# Altium footprint library FootPrintLib_10.PcbLib: 270 footprints (part 3 of 17)
Each footprint in its own frame and in the unit in brackets; x right, y up, seen from the top. Pads: shape width x height; smd on the part's side, far side on the other; paste and mask are expansions set on the pad; w line width, h text height; cw(c..) or ccw(c..) is an arc to the next point about the centre after c.
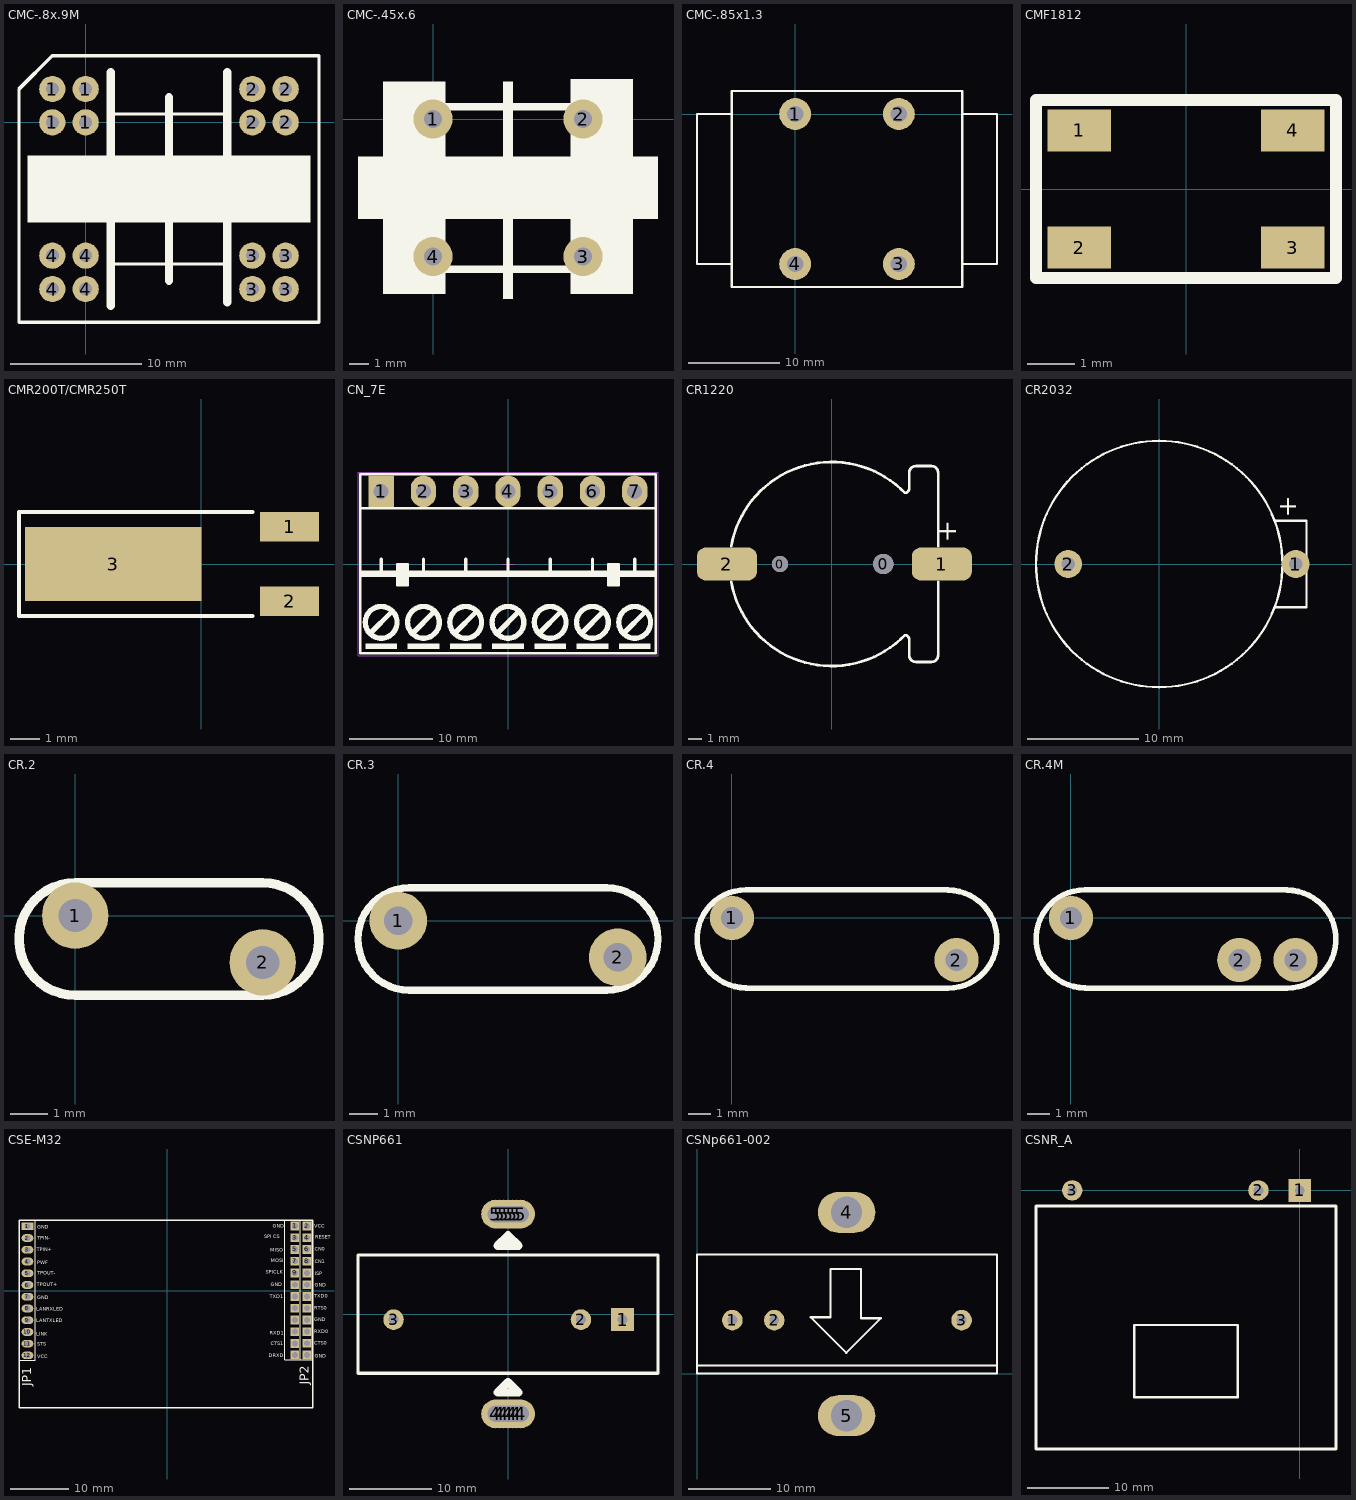
[diagram p2: the footprints below, top view; thin cyan lines are the x and y axes]

## CMC-.8x.9M [mm]
pads (16):
  round 2 hole 1: 1(-2.54,0) 1(-2.54,2.54) 1(0,0) 1(0,2.54) 2(12.7,0) 2(12.7,2.54) 2(15.24,0) 2(15.24,2.54) 3(12.7,-12.7) 3(12.7,-10.16) 3(15.24,-12.7) 3(15.24,-10.16) 4(-2.54,-12.7) 4(-2.54,-10.16) 4(0,-12.7) 4(0,-10.16)
Top Overlay:
  rectangle: -4.445,-7.62 17.145,-2.54
  lines w0.254: 1.905,-10.795 10.795,-10.795 ; 1.905,0.635 6.35,0.635 ; 6.35,1.905 6.35,0.635 ; 10.795,0.635 6.35,0.635 ; -5.08,-15.24 -5.08,2.54 -2.54,5.08 17.78,5.08 17.78,-15.24 -5.08,-15.24
  lines w0.635: 1.905,-13.97 1.905,3.81 ; 6.35,-12.065 6.35,1.905 ; 10.795,-13.716 10.795,3.81

## CMC-.45x.6 [mm]
pads (4):
  round 2 hole 0.9: 1(0,0) 2(7.62,0) 3(7.62,-6.985) 4(0,-6.985)
Top Overlay:
  rectangle: -3.81,-5.08 11.43,-1.905
  rectangle: 3.556,-9.144 4.064,1.905
  rectangle: -2.54,-8.89 0.635,1.905
  rectangle: 6.985,-8.89 10.16,2.032
  lines w0.381: 0.635,-7.62 6.985,-7.62 ; 0.635,0.635 6.985,0.635

## CMC-.85x1.3 [mm]
pads (4):
  round 3.5 hole 1.8: 1(0,0) 2(11.43,0) 3(11.43,-16.51) 4(0,-16.51)
Top Overlay:
  lines w0.254: -6.985,-16.51 -10.795,-16.51 -10.795,0 -6.985,0 ; 18.415,-16.51 22.225,-16.51 22.225,0 18.415,0 ; -6.985,-19.05 18.415,-19.05 18.415,2.54 -6.985,2.54 -6.985,-19.05

## CMF1812 [mm]
height 3
pads (4):
  rect 1.35x0.9 smd: 1(-2.275,1.25) 2(-2.275,-1.25) 3(2.275,-1.25) 4(2.275,1.25)
Top Overlay:
  lines w0.254: -3.2,-1.9 -3.2,1.9 3.2,1.9 3.2,-1.9 -3.2,-1.9

## CMR200T/CMR250T [mm]
height 2
pads (3):
  rect 2x1 smd: 1(3,1.27) 2(3,-1.27)
  rect 6x2.5 smd: 3(-3,0)
Top Overlay:
  lines w0.127: 1.75,-1.77 -6.2,-1.77 -6.2,1.77 1.75,1.77
3D body "User Library-CMR200TB.STEP": height 2, standoff 0, extent -5.609,-1.527 3.368,1.527

## CN_7E [mm] "Connector; Power Terminal Series; 7 Position; 5.08mm Spaced ,Right Angle"
height 13.9
pads (7):
  rect 3.048x3.81 hole 1.8: 1(-15.247,8.733)
  oval 3.048x3.81 hole 1.8: 2(-10.167,8.733) 3(-5.087,8.733) 4(-0.007,8.733) 5(5.073,8.733) 6(10.153,8.733) 7(15.233,8.733)
Top Overlay:
  circle w0.635: c15.233,-7.015 r1.905
  circle w0.635: c10.153,-7.015 r1.905
  circle w0.635: c5.073,-7.015 r1.905
  circle w0.635: c-0.007,-7.015 r1.905
  circle w0.635: c-5.087,-7.015 r1.905
  circle w0.635: c-10.167,-7.015 r1.905
  circle w0.635: c-15.247,-7.015 r1.905
  rectangle: -13.342,-2.57 -12.072,-0.03
  rectangle: -6.992,-10.19 -3.182,-9.555
  rectangle: -12.072,-10.19 -8.262,-9.555
  region: 13.328,-0.03 12.058,-0.03 12.058,-2.57 13.328,-2.57
  rectangle: -17.152,-10.19 -13.342,-9.555
  rectangle: 3.168,-10.19 6.978,-9.555
  rectangle: 8.248,-10.19 12.058,-9.555
  rectangle: 13.328,-10.19 17.138,-9.555
  rectangle: -1.912,-10.19 1.898,-9.555
  lines w0.254: -17.787,6.701 17.773,6.701
  lines w0.305: -17.787,-10.735 17.743,-10.735 17.773,10.765 -17.787,10.765 -17.787,-10.735 ; -13.342,-2.57 -12.072,-2.57 -12.072,-0.03 -13.342,-0.03 -13.342,-2.57 ; 12.058,-2.57 13.328,-2.57 13.328,-0.03 12.058,-0.03 12.058,-2.57
  lines w0.381: -15.247,-0.885 -15.247,0.605 ; -10.167,-0.885 -10.167,0.605 ; -5.087,-0.885 -5.087,0.605 ; -0.007,-0.885 -0.007,0.605 ; 5.073,-0.885 5.073,0.605 ; 10.153,-0.885 10.153,0.605 ; 15.233,-0.885 15.233,0.605
  lines w0.635: -16.517,-8.285 -13.977,-5.745 ; -11.437,-8.285 -8.897,-5.745 ; -6.357,-8.285 -3.817,-5.745 ; -1.277,-8.285 1.263,-5.745 ; 3.803,-8.285 6.343,-5.745 ; 8.883,-8.285 11.423,-5.745 ; 13.963,-8.285 16.503,-5.745
  lines w0.762: -17.533,-1.173 17.519,-1.173
Mechanical 15:
  lines w0.1: -0.755,0 0,0 ; 0,-0.755 0,0 ; 0,0.755 0,0 ; 0.755,0 0,0 ; -18.034,-11.049 18.034,-11.049 18.034,11.049 -18.034,11.049 -18.034,-11.049
3D body "power phonix 7 f.stp": height 15.17, standoff 0.18, extent -17.78,-11.16 17.78,7.04
3D body "power phonix 7 m.stp": height 8.6, standoff -3.5, extent -17.78,-1.26 17.78,10.742

## CR1220 [mm] "Battery Holder, Lead Spacing 19mm"
height 4.25
pads (4):
  round 1.2 hole 1.2: 0(-3.8,0)
  round 1.5 hole 1.5: 0(3.8,0)
  rrect50% 4.4x2.4 smd: 1(8.1,0) 2(-7.7,0)
Top Overlay:
  lines w0.2: -7.387,-1.298 ccw(c0,0) 5.378,-5.227 cw(c5.378,-5.549) 5.7,-5.549 5.7,-6.7 ccw(c6.2,-6.7) 6.2,-7.2 7.325,-7.2 ccw(c7.325,-6.7) 7.825,-6.7 7.825,-1.3 ; -7.387,1.298 cw(c0,0) 5.378,5.227 ccw(c5.378,5.549) 5.7,5.549 5.7,6.7 cw(c6.2,6.7) 6.2,7.2 7.325,7.2 cw(c7.325,6.7) 7.825,6.7 7.825,1.3
  text "+" at 9.652,1.575 h2.5
3D body: height 0.25, standoff -18, extent 6.5,3.625 6.5,3.625
3D body: height 0.25, standoff -18, extent 6.875,3.925 6.875,3.925
3D body "CR1220_H.step": height 4.28, standoff -0.47, extent -9.2,-7.374 9.6,7.375

## CR2032 [mm] "Battery Holder, Lead Spacing 20.5mm"
height 7.6
pads (2):
  round 2.5 hole 1.2: 1(12.3,0) 2(-8.2,0)
Top Overlay:
  circle w0.2: c0,0 r11.1
  lines w0.2: 10.425,-3.9 13.275,-3.9 13.275,3.9 10.425,3.9
  text "+" at 12.925,4.15 h3
3D body: height 0.25, standoff -18, extent 6.875,3.925 6.875,3.925
3D body: height 0.25, standoff -18, extent 6.5,3.625 6.5,3.625
3D body "CR2032 Lithium Battery Holder.step": height 8.6, standoff -4.2, extent -11.15,-11.15 13.15,11.15

## CR.2 [mm]
pads (2):
  round 1.8 hole 0.9: 1(0,0) 2(5.08,-1.27)
Top Overlay:
  lines w0.254: 0,-2.159 cw(c0,-0.635) 0,0.889 5.08,0.889 cw(c5.08,-0.635) 5.08,-2.159 0,-2.159

## CR.3 [mm]
pads (2):
  round 2 hole 1: 1(0,0) 2(7.62,-1.27)
Top Overlay:
  lines w0.254: 0.381,-2.413 cw(c0.381,-0.635) 0.381,1.143 7.239,1.143 cw(c7.239,-0.635) 7.239,-2.413 0.381,-2.413

## CR.4 [mm]
pads (2):
  round 2 hole 1: 1(0,0) 2(10.16,-1.905)
Top Overlay:
  lines w0.254: 0.635,-3.175 9.779,-3.175 ccw(c9.779,-0.959) 9.779,1.257 ; 0.635,-3.162 cw(c0.635,-0.946) 0.635,1.27 9.779,1.27

## CR.4M [mm]
pads (3):
  round 2 hole 1: 1(0,0) 2(7.62,-1.905) 2(10.16,-1.905)
Top Overlay:
  lines w0.254: 0.635,-3.175 9.779,-3.175 ccw(c9.779,-0.959) 9.779,1.257 ; 0.635,-3.162 cw(c0.635,-0.946) 0.635,1.27 9.779,1.27

## CSE-M32 [mm]
pads (36):
  rect 2x1.3 hole 1: 1(-23.8,10.964)
  rect 1.5x1.5 hole 1: 1(21.743,11.018) 2(23.799,11.015) 3(21.743,9.018) 4(23.799,9.015) 5(21.743,7.018) 6(23.799,7.015) 7(21.743,5.018) 8(23.799,5.015) 9(21.743,3.018) 10(23.799,3.015) 11(21.743,1.018) 12(23.799,1.015) 13(21.743,-0.982) 14(23.799,-0.985) 15(21.743,-2.982) 16(23.799,-2.985) 17(21.743,-4.982) 18(23.799,-4.985) 19(21.743,-6.982) 20(23.799,-6.985) 21(21.743,-8.982) 22(23.8,-8.967) 23(21.743,-10.982) 24(23.8,-10.967)
  oval 2x1.3 hole 1: 2(-23.8,8.964) 3(-23.8,6.964) 4(-23.8,4.964) 5(-23.8,2.964) 6(-23.8,0.964) 7(-23.8,-1.036) 8(-23.8,-3.036) 9(-23.8,-5.036) 10(-23.8,-7.036) 11(-23.799,-9.018) 12(-23.799,-11.018)
Top Overlay:
  lines w0.2: 22.05,-11.772 24.691,-11.772 24.691,12.002 24.666,12.027 22.05,12.027 ; 23.04,12.013 23.066,11.988 ; -25.118,-11.823 -25.118,11.977 -22.502,11.977 -22.477,11.951 -22.477,-11.823 -25.118,-11.823 ; 19.992,-11.787 19.992,12.013 22.698,12.013 22.698,-11.787 19.992,-11.787
  lines w0.254: -25.245,-19.977 24.755,-19.977 24.755,12.023 -25.245,12.023 -25.245,-19.977
  text "VCC" at -22.174,-11.523 h0.64
  text "GND" at -22.174,-1.464 h0.64
  text "STS" at -22.148,-9.389 h0.64
  text "LINK" at -22.326,-7.687 h0.64
  text "LANTXLED" at -22.326,-5.376 h0.64
  text "LANRXLED" at -22.301,-3.445 h0.64
  text "PWF" at -22.174,4.53 h0.64
  text "TPOUT+" at -22.224,0.771 h0.64
  text "TPOUT-" at -22.174,2.676 h0.64
  text "TPIN+" at -22.199,6.715 h0.64
  text "TPIN-" at -22.174,8.67 h0.64
  text "GND" at -22.148,10.525 h0.64
  text "JP2" at 24.079,-16.011 h1.52
  text "JP1" at -23.191,-16.265 h1.52
  text "GND" at 17.958,10.753 h0.64
  text "VCC" at 25.07,10.753 h0.64
  text "SPI CS" at 16.536,8.899 h0.64
  text "RESET" at 25.223,8.874 h0.64
  text "MISO" at 17.552,6.638 h0.64
  text "CN0" at 25.096,6.816 h0.64
  text "MOSI" at 17.628,4.835 h0.64
  text "CN1" at 25.121,4.708 h0.64
  text "SPICLK" at 16.765,2.854 h0.64
  text "ISP" at 25.172,2.625 h0.64
  text "GND" at 17.679,0.771 h0.64
  text "GND" at 25.121,0.669 h0.64
  text "TXD1" at 17.476,-1.261 h0.64
  text "TXD0" at 25.02,-1.21 h0.64
  text "RTS0" at 25.07,-3.217 h0.64
  text "GND" at 25.07,-5.223 h0.64
  text "RXD1" at 17.5,-7.476 h0.64
  text "RXD0" at 25.07,-7.255 h0.64
  text "CTS1" at 17.679,-9.262 h0.64
  text "CTS0" at 25.07,-9.186 h0.64
  text "DRXD" at 17.273,-11.319 h0.64
  text "GND" at 25.096,-11.421 h0.64

## CSNP661 [mm]
pads (17):
  rect 2.794x2.794 hole 1.2: 1(13.97,-0.685)
  round 2.5 hole 1.2: 2(8.89,-0.685) 3(-13.97,-0.685)
  round 3.5 hole 2: 4(-1.524,-12.192) 4(-1.016,-12.192) 4(-0.508,-12.192) 4(0,-12.192) 4(0.508,-12.192) 4(1.016,-12.192) 4(1.524,-12.192) 5(-1.524,12.192) 5(-1.016,12.192) 5(-0.508,12.192) 5(0,12.192) 5(0.508,12.192) 5(1.016,12.192) 5(1.524,12.192)
Top Overlay:
  lines w0.381: -18.31,-7.235 18.29,-7.235 18.29,7.215 -18.31,7.215 -18.31,-7.235
  lines w1: -1.27,-9.575 1.27,-9.575 0,-8.305 -1.27,-9.575 ; -1.27,8.332 0,9.602 1.27,8.332 -1.27,8.332

## CSNp661-002 [mm]
pads (5):
  round 2.5 hole 1.2: 1(4.3,6.5) 2(9.4,6.5) 3(32.2,6.5)
  oval 7x5 hole 3.8: 4(18.2,19.62) 5(18.2,-5.12)
Top Overlay:
  lines w0.254: 0,1 36.5,1 ; 0,0 0,14.5 36.5,14.5 36.5,0 0,0 ; 13.843,6.858 16.256,6.858 16.256,12.7 19.939,12.7 19.939,6.731 22.352,6.731 18.161,2.54 13.843,6.858

## CSNR_A [mm]
pads (3):
  rect 2.794x2.794 hole 1.2: 1(0,0)
  round 2.5 hole 1.2: 2(-5.08,0) 3(-27.94,0)
Top Overlay:
  lines w0.254: -20.32,-25.4 -20.32,-16.51 -7.62,-16.51 -7.62,-25.4 -20.32,-25.4
  lines w0.381: -32.385,-31.75 -32.385,-1.905 4.445,-1.905 4.445,-31.75 -32.385,-31.75